# Altium schematic symbol library SnapEDAsch.SchLib: 1 symbol
Pins are listed as number, name and electrical type; pins without a type are passive.

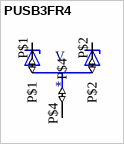
[diagram p0: symbol PUSB3FR4]

## PUSB3FR4
designator V
3V (Typ) Clamp 5A (8/20Âµs) Ipp Tvs Diode Surface Mount DFN2510A-10; MP: PUSB3FR4; MF: Nexperia USA; Package: XFDFN-10 Nexperia USA; SnapEDA_Link: https://www.snapeda.com/parts/PUSB3FR4/Nexperia%20USA%20Inc./view-part/2711241/?ref=snap; Value: *; Digi-Key_Part_Number: 1727-2026-1-ND
footprint SOT886_FR4
pins: P$1 (io), P$2 (io), P$4 (io)